# EAGLE library part TRIFILAR_XFMR_TAP (library HansToroid)
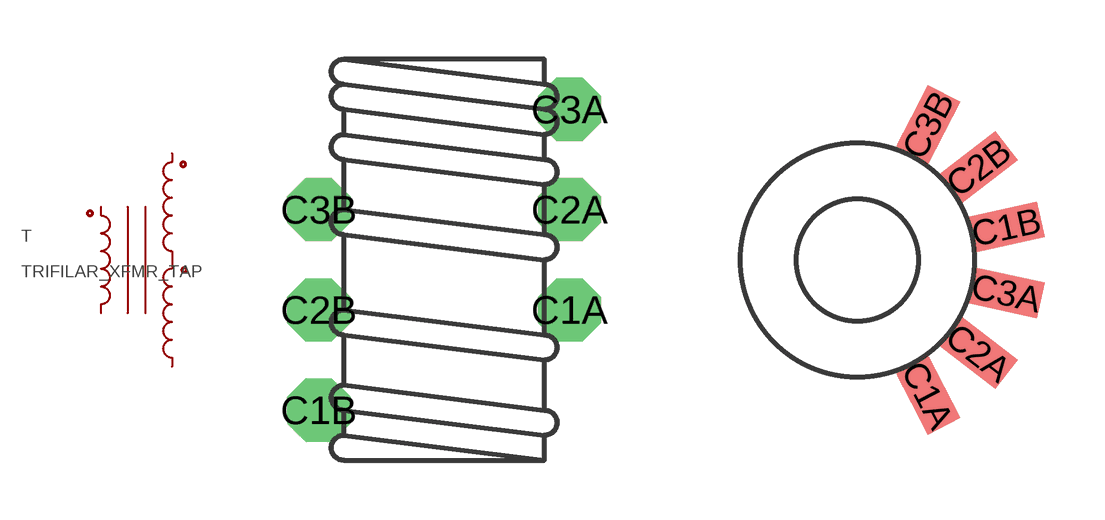
[diagram p4: symbol with the pads of T37_TRIFILAR_TRANSFORMER; footprints T37_TRIFILAR_TRANSFORMER, T23_TRIFILAR_TRANS_FLAT_SMD]

Designator prefix T

## TRIFILAR_XFMR_TAP  [T37_TRIFILAR_TRANSFORMER]
C1A  C1A
C1B  C1B
C2A  C2A
C2B  C2B
C3A  C3A
C3B  C3B

## TRIFILAR_XFMR_TAPT23_FLAT_SMD  [T23_TRIFILAR_TRANS_FLAT_SMD]
Pads as for T37_TRIFILAR_TRANSFORMER

## Footprint T37_TRIFILAR_TRANSFORMER (pad centres in mm)
Transformer wound on a T37 Toroid
drill 0.914 pad 1.6 octagon: C1A 3.175,-1.27; C1B -3.175,-3.81; C2A 3.175,1.27; C2B -3.175,-1.27; C3A 3.175,3.81; C3B -3.175,1.27

## Footprint T23_TRIFILAR_TRANS_FLAT_SMD (pad centres in mm)
Transformer (having 3 windings) on a T50 Toroid
smd 1.778 x 0.914 rotated 297.5: C1A 1.759,-3.38
smd 1.778 x 0.914 rotated 12.5: C1B 3.72,0.825
smd 1.778 x 0.914 rotated 322.5: C2A 3.023,-2.319
smd 1.778 x 0.914 rotated 37.5: C2B 3.023,2.319
smd 1.778 x 0.914 rotated 347.5: C3A 3.72,-0.825
smd 1.778 x 0.914 rotated 62.5: C3B 1.759,3.38